# Altium footprint library FootPrintLib_8.PcbLib: 590 footprints (part 34 of 37)
Each footprint in its own frame and in the unit in brackets; x right, y up, seen from the top. Pads: shape width x height; smd on the part's side, far side on the other; paste and mask are expansions set on the pad; w line width, h text height; cw(c..) or ccw(c..) is an arc to the next point about the centre after c.
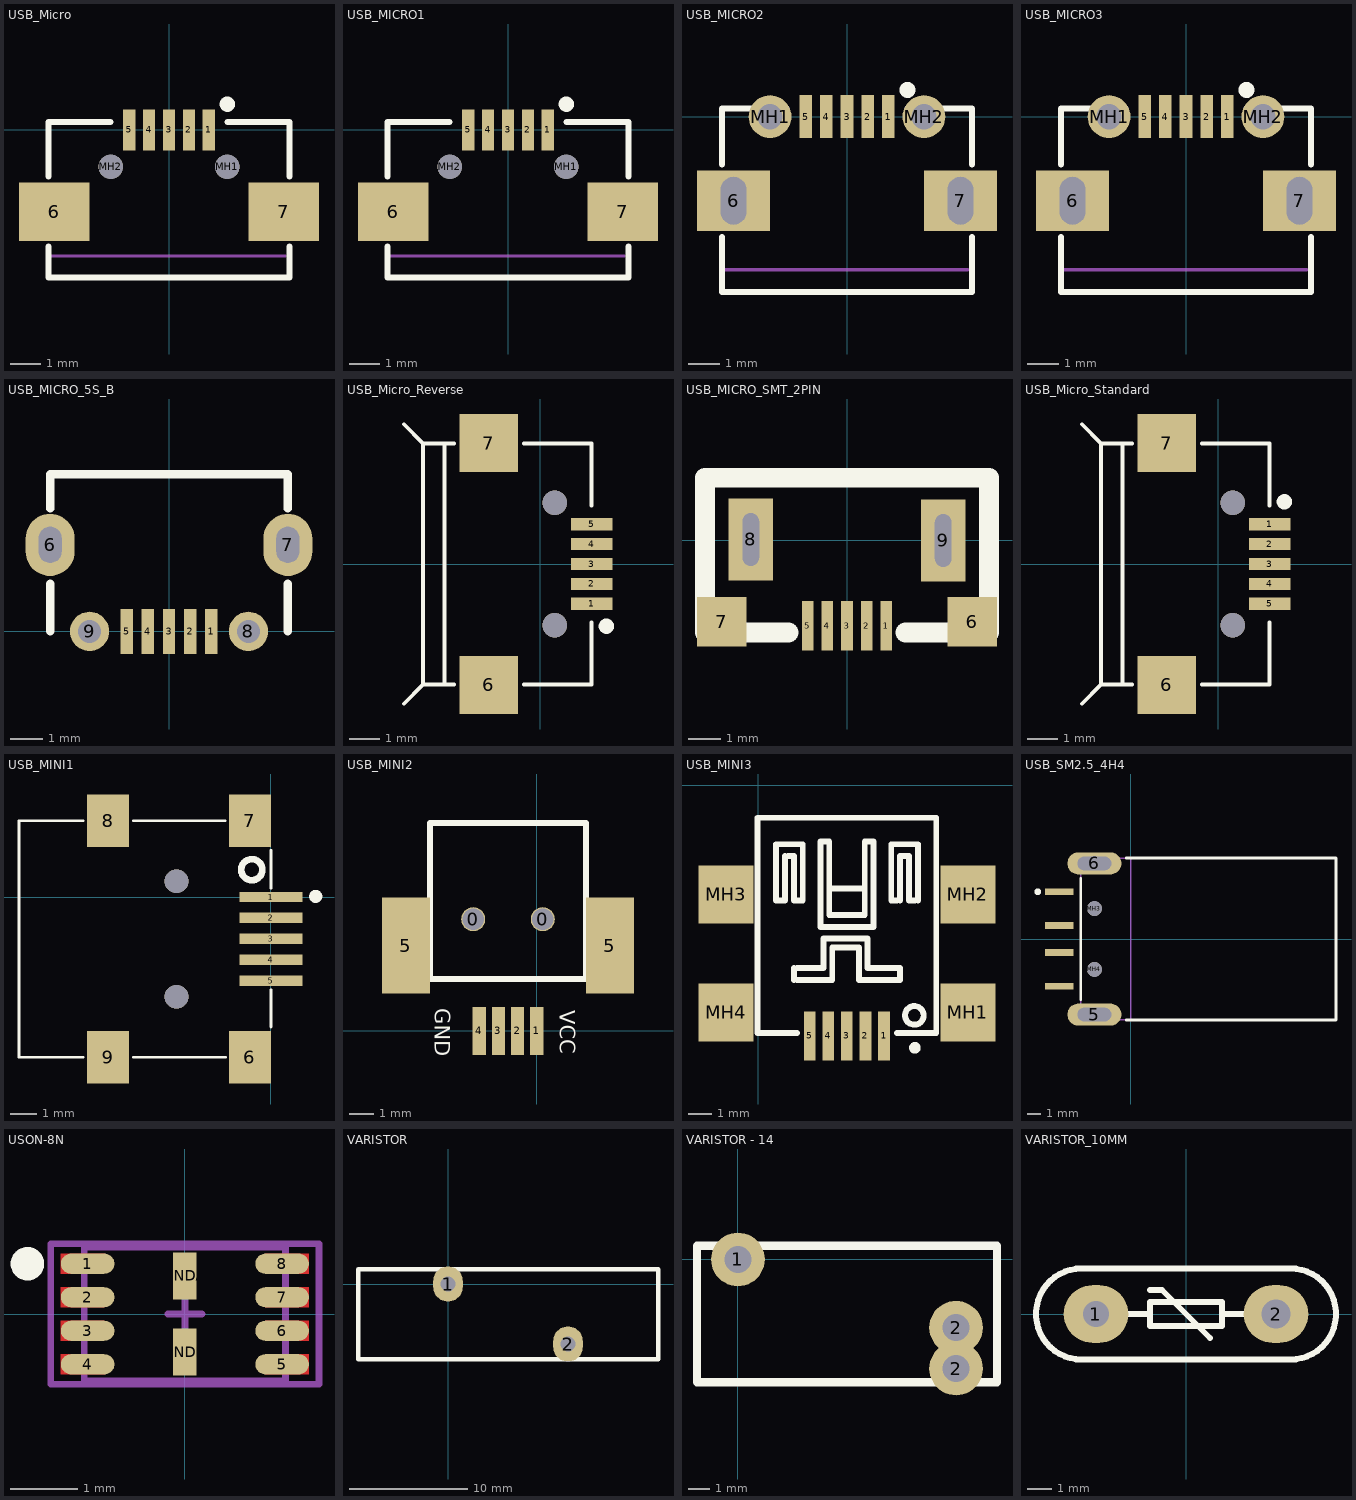
[diagram p33: the footprints below, top view; thin cyan lines are the x and y axes]

## USB_Micro [mm]
pads (9):
  rect 0.4x1.35 smd: 1(1.3,0) 2(0.65,0) 3(0,0) 4(-0.65,0) 5(-1.3,0)
  rect 2.3x1.9 smd: 6(-3.75,-2.675) 7(3.75,-2.675)
  round 0.8 hole 0.8 unplated: MH1(1.9,-1.208) MH2(-1.9,-1.208)
Top Overlay:
  circle w0.25: c1.905,0.84 r0.125
  lines w0.2: -3.937,-3.81 -3.937,-4.825 3.937,-4.825 3.937,-3.81 ; -3.937,-1.524 -3.937,0.254 -1.905,0.254 ; 1.905,0.254 3.937,0.254 3.937,-1.524
Mechanical 13:
  lines w0.1: -3.937,-4.125 3.81,-4.125
3D body "Micro_USB.STEP": height 2.77, standoff -0.17, extent -3.99,-5.193 3.99,0.237

## USB_MICRO1 [mm]
pads (9):
  rect 0.4x1.35 smd: 1(1.3,0) 2(0.65,0) 3(0,0) 4(-0.65,0) 5(-1.3,0)
  rect 2.3x1.9 smd: 6(-3.75,-2.675) 7(3.75,-2.675)
  round 0.8 hole 0.8 unplated: MH1(1.9,-1.208) MH2(-1.9,-1.208)
Top Overlay:
  circle w0.25: c1.905,0.84 r0.125
  lines w0.2: -3.937,-3.81 -3.937,-4.825 3.937,-4.825 3.937,-3.81 ; -3.937,-1.524 -3.937,0.254 -1.905,0.254 ; 1.905,0.254 3.937,0.254 3.937,-1.524
Mechanical 13:
  lines w0.1: -3.937,-4.125 3.81,-4.125
3D body "Micro_USB_1.STEP": height 2.79, standoff -0.28, extent -4.4,-5.416 4.4,0.209

## USB_MICRO2 [mm]
pads (9):
  rect 0.4x1.35 smd: 1(1.3,0) 2(0.65,0) 3(0,0) 4(-0.65,0) 5(-1.3,0)
  rect 2.3x1.9 hole 0.8 slot 1.5 at 90 deg: 6(-3.575,-2.65) 7(3.575,-2.65)
  round 1.35 hole 0.8 unplated: MH1(-2.425,0) MH2(2.425,0)
Top Overlay:
  circle w0.25: c1.905,0.84 r0.125
  lines w0.2: -3.937,-3.8 -3.937,-5.525 3.937,-5.525 3.937,-3.8 ; -3.937,-1.5 -3.937,0.254 -1.905,0.254 ; 1.905,0.254 3.937,0.254 3.937,-1.5
Mechanical 13:
  lines w0.1: -3.937,-4.825 3.81,-4.825
3D body "Micro_USB_2.STEP": height 2.88, standoff -0.43, extent -4.1,-5.28 4.1,0.15

## USB_MICRO3 [mm]
pads (9):
  rect 0.4x1.35 smd: 1(1.3,0) 2(0.65,0) 3(0,0) 4(-0.65,0) 5(-1.3,0)
  rect 2.3x1.9 hole 0.8 slot 1.5 at 90 deg: 6(-3.575,-2.65) 7(3.575,-2.65)
  round 1.35 hole 0.8 unplated: MH1(-2.425,0) MH2(2.425,0)
Top Overlay:
  circle w0.25: c1.905,0.84 r0.125
  lines w0.2: -3.937,-3.8 -3.937,-5.525 3.937,-5.525 3.937,-3.8 ; -3.937,-1.5 -3.937,0.254 -1.905,0.254 ; 1.905,0.254 3.937,0.254 3.937,-1.5
Mechanical 13:
  lines w0.1: -3.937,-4.825 3.81,-4.825
3D body "Micro_USB_3.STEP": height 2.79, standoff -0.87, extent -4.06,-5.316 4.061,0.309

## USB_MICRO_5S_B [mil] "USB Micro SMT 5S B"
height 118.11
pads (9):
  rect 15x54 smd: 1(51,0) 2(25.5,0) 3(0,0) 4(-25.5,0) 5(-51,0)
  oval 59.06x74.8 hole 27.56 slot 43.31 at 90 deg: 6(-143,104) 7(143,104)
  round 47.24 hole 27.5: 8(95.5,0) 9(-95.5,0)
Top Overlay:
  lines w10: -142.72,0 -142.72,57.28 ; -142.72,147.72 -142.72,188.98 142.72,188.98 142.72,147.72 ; 142.72,0 142.72,57.28
3D body "User Library-Micro USB-B_Molex_105017-0001.step": height 105.31, standoff -24.61, extent -161.42,-9.33 161.41,204.44

## USB_Micro_Reverse [mm] "Micro USB Dock 5 Pin Reverse"
height 3
pads (7):
  rect 1.35x0.4 smd: 1(1.679,-1.3) 2(1.679,-0.65) 3(1.679,0) 4(1.679,0.65) 5(1.679,1.3)
  rect 1.9x1.9 smd: 6(-1.679,-3.95) 7(-1.679,3.95)
via 0.471,2 diameter 0.8 hole 0.8
via 0.471,-2 diameter 0.8 hole 0.8
Top Overlay:
  circle w0.25: c2.161,-2.032 r0.125
  lines w0.127: -4.459,-4.567 -3.829,-3.937 -2.813,-3.937 ; -4.459,4.567 -3.829,3.937 -2.813,3.937 ; -3.829,-3.9 -3.829,3.9 ; -3.13,-3.863 -3.13,3.937 ; -0.527,-3.937 1.679,-3.937 ; -0.527,3.937 1.679,3.937 ; 1.679,-3.9 1.679,-1.905 ; 1.679,1.905 1.679,3.9
3D body "User Library-Micro USB.step": height 2.67, standoff -0.27, extent -4.318,-3.99 1.112,3.99

## USB_MICRO_SMT_2PIN [mm] "USB MICRO SMT 2PIN"
height 3
pads (9):
  rect 0.35x1.5 smd: 1(1.2,-2.59) 2(0.6,-2.59) 3(0,-2.59) 4(-0.6,-2.59) 5(-1.2,-2.59)
  rrect0% 1.5x1.5 smd: 6(3.81,-2.47) 7(-3.81,-2.47)
  rect 1.35x2.5 hole 0.5 slot 1.6 at 90 deg: 8(-2.925,0.03) 9(2.925,0)
Top Overlay:
  lines w0.6: -1.778,-2.8 -4.318,-2.8 -4.318,1.91 4.318,1.91 4.318,-2.8 1.778,-2.8

## USB_Micro_Standard [mm] "Micro USB Dock 5 Pin Standard"
height 3
pads (7):
  rect 1.35x0.4 smd: 1(1.679,1.3) 2(1.679,0.65) 3(1.679,0) 4(1.679,-0.65) 5(1.679,-1.3)
  rect 1.9x1.9 smd: 6(-1.679,-3.95) 7(-1.679,3.95)
via 0.471,-2 diameter 0.8 hole 0.8
via 0.471,2 diameter 0.8 hole 0.8
Top Overlay:
  circle w0.25: c2.161,2.032 r0.125
  lines w0.127: -4.459,-4.567 -3.829,-3.937 -2.813,-3.937 ; -4.459,4.567 -3.829,3.937 -2.813,3.937 ; -3.829,-3.9 -3.829,3.9 ; -3.13,-3.863 -3.13,3.937 ; -0.527,-3.937 1.679,-3.937 ; -0.527,3.937 1.679,3.937 ; 1.679,-3.9 1.679,-1.905 ; 1.679,1.905 1.679,3.9
3D body "User Library-Micro USB.step": height 2.67, standoff -0.27, extent -4.318,-3.99 1.112,3.99

## USB_MINI1 [mm] "USB Mini SMT"
height 5.08
pads (9):
  rect 2.4x0.4 smd: 1(0,0) 2(0,-0.8) 3(0,-1.6) 4(0,-2.4) 5(0,-3.2)
  rect 1.6x2 smd: 6(-0.8,-6.1) 7(-0.8,2.9) 8(-6.2,2.9) 9(-6.2,-6.1)
via -3.6,0.6 diameter 0.9 hole 0.9
via -3.6,-3.8 diameter 0.9 hole 0.9
Top Overlay:
  circle w0.254: c-0.732,1.041 r0.402
  circle w0.25: c1.704,0.025 r0.125
  lines w0.1: -7.163,-6.1 -9.6,-6.1 -9.6,2.9 -7.163,2.9 ; -5.248,-6.1 -1.727,-6.1 ; -5.248,2.9 -1.752,2.9 ; 0,-4.953 0,-3.531 ; 0,0.33 0,1.778
3D body "User Library-USB_mini_B.step": height 3.95, standoff -1, extent -9.525,-6.95 -0.325,3.75

## USB_MINI2 [mm] "USB Mini SMT"
height 5.08
pads (8):
  round 1 hole 0.9: 0(-2.65,4.65) 0(0.25,4.65)
  rect 0.55x2 smd: 1(0,0) 2(-0.8,0) 3(-1.6,0) 4(-2.4,0)
  rect 2x4 smd: 5(-5.45,3.55) 5(3.05,3.55)
Top Overlay:
  lines w0.254: -4.45,2.15 -4.45,8.65 2.05,8.65 2.05,2.15 -4.45,2.15
  text "VCC" at 0.95,0.85 h0.64
  text "GND" at -4.25,0.95 h0.64

## USB_MINI3 [mm] "USB Mini SMT"
height 5.08
pads (9):
  rect 0.5x2.096 smd: 1(5.404,-10.792) 2(4.604,-10.792) 3(3.804,-10.792) 4(3.004,-10.792) 5(2.204,-10.792)
  rect 2.35x2.5 smd: MH1(9.017,-9.779) MH2(9.017,-4.699) MH3(-1.397,-4.699) MH4(-1.397,-9.779)
Top Overlay:
  circle w0.254: c6.71,-9.906 r0.402
  circle w0.25: c6.733,-11.303 r0.125
  lines w0.254: 1.143,-3.048 1.143,-4.953 0.762,-4.953 0.762,-2.54 1.905,-2.54 1.905,-4.953 1.524,-4.953 1.524,-3.048 1.27,-3.048 ; 1.524,-8.382 1.524,-7.874 ; 1.651,-10.668 -0.046,-10.668 -0.046,-1.397 7.654,-1.397 7.654,-10.668 5.969,-10.668 ; 1.651,-8.382 3.175,-8.382 3.175,-6.985 4.318,-6.985 4.318,-8.382 6.096,-8.382 6.096,-7.874 4.699,-7.874 4.699,-6.604 2.794,-6.604 2.794,-7.874 1.651,-7.874 ; 3.048,-4.445 4.572,-4.445 ; 5.969,-4.953 5.715,-4.953 5.715,-2.54 6.858,-2.54 6.858,-4.953 ; 6.096,-4.953 6.096,-3.048 6.477,-3.048 6.477,-4.953 6.731,-4.953 ; 2.667,-6.096 2.667,-2.413 3.048,-2.413 3.048,-5.588 4.572,-5.588 4.572,-2.413 4.953,-2.413 4.953,-6.096 2.667,-6.096

## USB_SM2.5_4H4 [mm] "Connector; USB1.1, Type A, SM; 4 Position; Right Angle"
height 4.5
pads (8):
  rect 2.1x0.5 smd: 1(-5.3,3.5) 2(-5.3,1) 3(-5.3,-1) 4(-5.3,-3.5)
  oval 4x1.65 hole 1 slot 2.5 at 0 deg: 5(-2.7,-5.6) 6(-2.7,5.6)
  round 1.1 hole 1.1 unplated paste-2539.97 mask-2.54: MH3(-2.7,2.25) MH4(-2.7,-2.25)
Top Overlay:
  circle w0.25: c-6.9,3.5 r0.125
  lines w0.2: -3.7,-4.475 -3.7,4.475 ; -0.33,-6 15.2,-6 15.2,6 -0.33,6
Mechanical 13:
  lines w0.1: 0,-6 0,6 ; -3.7,-6 15.2,-6 15.2,6 -3.7,6 -3.7,-6
  text "PCB Edge" at 0.473,-5.173 h0.25
3D body "User Library-USBSM2.5-4H4.step": height 3.12, standoff -2.58, extent -5.702,-6.248 14.998,6.252

## USON-8N [mm]
height 0.6
pads (10):
  oval 0.8x0.3 smd paste+0 mask+0.102: 1(-1.45,0.75) 2(-1.45,0.25) 3(-1.45,-0.25) 4(-1.45,-0.75) 5(1.45,-0.75) 6(1.45,-0.25) 7(1.45,0.25) 8(1.45,0.75)
  rect 0.35x0.7 smd paste+0 mask+0.102: GNDA(0,0.57) GNDB(0,-0.57)
Top Layer:
  region: -1.2,0.6 -1.2,0.9 -1.85,0.9 -1.85,0.6
  region: -1.2,0.1 -1.2,0.4 -1.85,0.4 -1.85,0.1
  region: -1.2,-0.4 -1.2,-0.1 -1.85,-0.1 -1.85,-0.4
  region: -1.2,-0.9 -1.2,-0.6 -1.85,-0.6 -1.85,-0.9
  region: 1.2,0.9 1.2,0.6 1.85,0.6 1.85,0.9
  region: 1.2,0.4 1.2,0.1 1.85,0.1 1.85,0.4
  region: 1.2,-0.1 1.2,-0.4 1.85,-0.4 1.85,-0.1
  region: 1.2,-0.6 1.2,-0.9 1.85,-0.9 1.85,-0.6
Top Overlay:
  circle w0.25: c-2.35,0.75 r0.125
Top Paste:
  region: -1.2,0.6 -1.2,0.9 -1.85,0.9 -1.85,0.6
  region: -1.2,0.1 -1.2,0.4 -1.85,0.4 -1.85,0.1
  region: -1.2,-0.4 -1.2,-0.1 -1.85,-0.1 -1.85,-0.4
  region: -1.2,-0.9 -1.2,-0.6 -1.85,-0.6 -1.85,-0.9
  region: 1.2,0.9 1.2,0.6 1.85,0.6 1.85,0.9
  region: 1.2,0.4 1.2,0.1 1.85,0.1 1.85,0.4
  region: 1.2,-0.1 1.2,-0.4 1.85,-0.4 1.85,-0.1
  region: 1.2,-0.6 1.2,-0.9 1.85,-0.9 1.85,-0.6
Top Solder:
  region: -1.95,1 -1.95,0.5 -1.2,0.5 -1.2,1
  region: -1.95,0.5 -1.95,0 -1.2,0 -1.2,0.5
  region: -1.95,0 -1.95,-0.5 -1.2,-0.5 -1.2,0
  region: -1.95,-0.5 -1.95,-1 -1.2,-1 -1.2,-0.5
  region: 1.95,0.5 1.95,1 1.2,1 1.2,0.5
  region: 1.95,0 1.95,0.5 1.2,0.5 1.2,0
  region: 1.95,-0.5 1.95,0 1.2,0 1.2,-0.5
  region: 1.95,-1 1.95,-0.5 1.2,-0.5 1.2,-1
Mechanical 13:
  lines w0.1: -1.5,-1 -1.5,1 1.5,1 1.5,-1 -1.5,-1
Mechanical 15:
  lines w0.1: -0.254,0 0.254,0 ; 0,-0.254 0,0.254 ; -2,-1.05 2,-1.05 2,1.05 -2,1.05 -2,-1.05
3D body "User Library-USON-8.step": height 0.6, standoff 0, extent -1.51,-1 1.51,1

## VARISTOR [mm]
pads (2):
  oval 2.5x3 hole 1.25: 1(0,0) 2(10.16,-5.08)
Top Overlay:
  lines w0.381: -7.62,-6.35 17.78,-6.35 17.78,1.27 -7.62,1.27 -7.62,-6.35

## VARISTOR - 14 [mm]
pads (3):
  round 2.5 hole 1.25: 1(0,0) 2(10.16,-5.08) 2(10.16,-3.175)
Top Overlay:
  lines w0.381: -1.905,-5.715 12.065,-5.715 12.065,0.635 -1.905,0.635 -1.905,-5.715

## VARISTOR_10MM [mm] "Varistor"
height 26
pads (2):
  oval 2.7x2.4 hole 1.1: 1(-3.75,0)
  oval 2.7x2.4 hole 1.2: 2(3.75,0)
Top Overlay:
  lines w0.254: -2.5,0 -1.5,0 ; -1.5,1 -1,1 1,-1 ; 1.5,0 2.5,0 ; -4.35,-1.9 cw(c-4.35,0) -4.35,1.9 4.35,1.9 cw(c4.35,0) 4.35,-1.9 -4.35,-1.9 ; -1.5,-0.5 -1.5,0.5 1.5,0.5 1.5,-0.5 -1.5,-0.5
3D body "User Library-final MOV7,5.STEP": height 16, standoff -2.5, extent -5.844,-1.425 5.558,1.401